# Altium schematic symbol library ALANS100X1-2F30DT.SchLib: 1 symbol
Pins are listed as number, name and electrical type; pins without a type are passive.

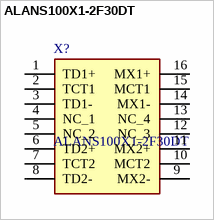
[diagram p0: symbol ALANS100X1-2F30DT]

## ALANS100X1-2F30DT
designator X?
350H Pulse Transformer 1CT:1CT Surface Mount; Manufacturer_Name: ABRACON; Geometry.Height: 5.9mm; Mouser Part Number: 815-ALANS100X12F30DT; Mouser Price/Stock: https://www.mouser.co.uk/ProductDetail/ABRACON/ALANS100X1-2F30DT?qs=mAH9sUMRCtuizu44xbH5Uw%3D%3D; Manufacturer_Part_Number: ALANS100X1-2F30DT; Datasheet Link: https://www.digikey.ph/en/products/detail/abracon-llc/ALANS100X1-2F30DT/10257827
footprint ALANS100X12F30DT
pins: 1 TD1+, 2 TCT1, 3 TD1-, 4 NC_1, 5 NC_2, 6 TD2+, 7 TCT2, 8 TD2-, 9 MX2-, 10 MCT2, 11 MX2+, 12 NC_3, 13 NC_4, 14 MX1-, 15 MCT1, 16 MX1+